# Altium footprint library Switch.PcbLib: 17 footprints (part 2 of 2)
Each footprint in its own frame and in the unit in brackets; x right, y up, seen from the top. Pads: shape width x height; smd on the part's side, far side on the other; paste and mask are expansions set on the pad; w line width, h text height; cw(c..) or ccw(c..) is an arc to the next point about the centre after c.
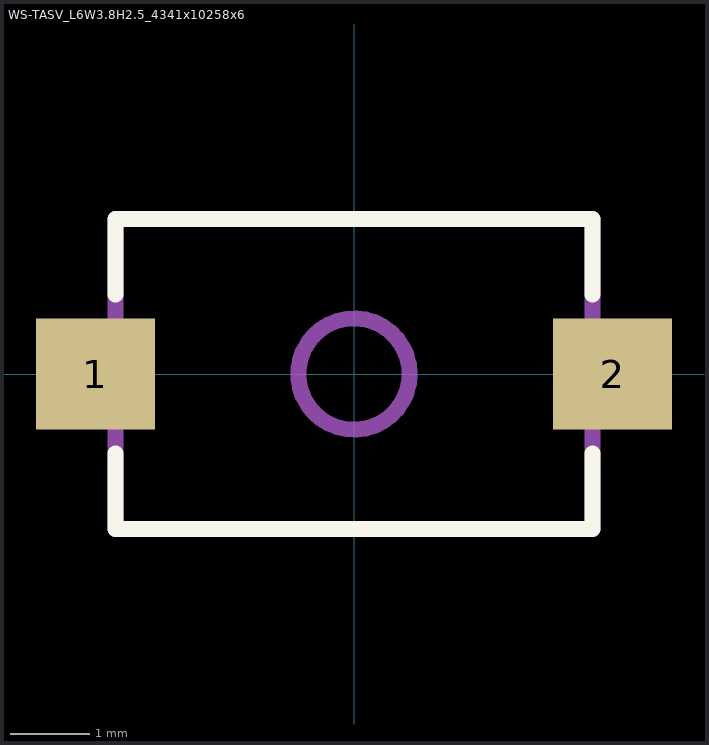
[diagram p1: the footprint, top view; thin cyan lines are the x and y axes]

## WS-TASV_L6W3.8H2.5_4341x10258x6 [mm] "SMD Tact Switch, body 6x3.8mm"
height 2.5
pads (2):
  rect 1.5x1.4 smd: 1(-3.25,0) 2(3.25,0)
Top Overlay:
  lines w0.2: -3,-1 -3,-1.95 3,-1.95 3,-1 ; -3,1 -3,1.95 3,1.95 3,1
Top Assembly:
  circle w0.2: c0,0 r0.7
  rectangle: -3.7,-0.5 -3,0.479
  region: 3.7,0.5 3,0.5 3,-0.479 3.7,-0.479
  lines w0.2: -3,-1.95 -3,1.95 3,1.95 3,-1.95 -3,-1.95
  text ".Designator" at -2.499,-1.467 h0.5
3D body "4341x10258xx.stp": height 2.5, standoff 0, extent -3.65,-1.95 3.65,1.95